# Altium schematic symbol library TS-108-G-AA.SchLib: 1 symbol
Pins are listed as number, name and electrical type; pins without a type are passive.

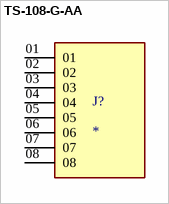
[diagram p0: symbol TS-108-G-AA]

## TS-108-G-AA
designator J?
Conn Unshrouded Header HDR 8 POS 2.54mm Solder ST Thru-Hole Tube; MF: Samtec; MP: TS-108-G-AA; Purchase-URL: https://pricing.snapeda.com/search/part/TS-108-G-AA/?ref=eda; SnapEDA_Link: https://www.snapeda.com/parts/TS-108-G-AA/Samtec/view-part/?ref=snap; Value: *; Check_prices: https://www.snapeda.com/parts/TS-108-G-AA/Samtec/view-part/?ref=eda; Availability: In Stock; Price: None; Package: None
footprint SAMTEC_TS-108-G-AA
pins: 01, 02, 03, 04, 05, 06, 07, 08